# Altium footprint library ACT45B-510-2P-TL003.PcbLib: 1 footprints
Each footprint in its own frame and in the unit in brackets; x right, y up, seen from the top. Pads: shape width x height; smd on the part's side, far side on the other; paste and mask are expansions set on the pad; w line width, h text height; cw(c..) or ccw(c..) is an arc to the next point about the centre after c.
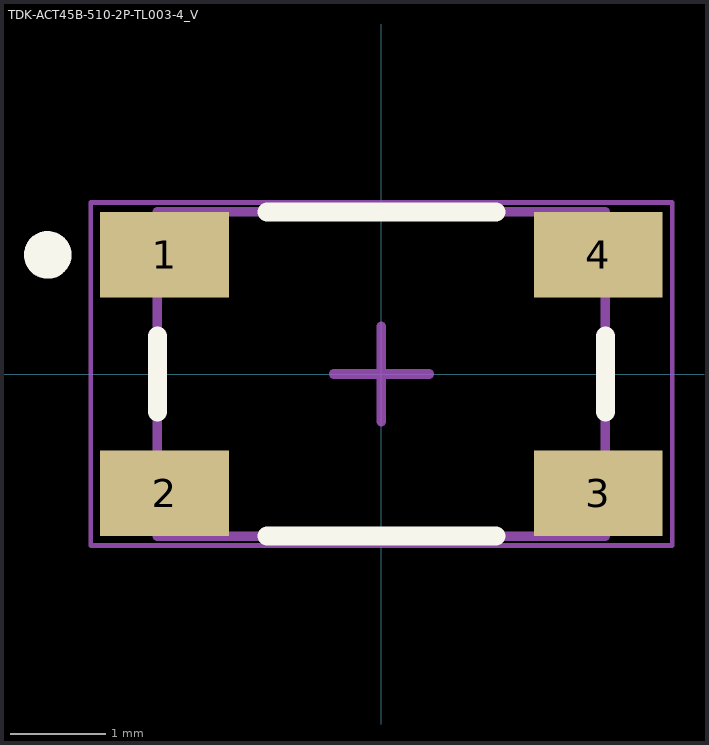
[diagram p0: the footprint, top view; thin cyan lines are the x and y axes]

## TDK-ACT45B-510-2P-TL003-4_V [mm] "SMD, 4-Leads, Body 4.7x3.4mm, Pitch 2.5mm"
height 3
pads (4):
  rect 1.35x0.9 smd: 1(-2.275,1.25) 2(-2.275,-1.25) 3(2.275,-1.25) 4(2.275,1.25)
Top Overlay:
  circle w0.25: c-3.5,1.25 r0.125
  lines w0.2: -2.35,-0.4 -2.35,0.4 ; -1.2,-1.7 1.2,-1.7 ; -1.2,1.7 1.2,1.7 ; 2.35,-0.4 2.35,0.4
Mechanical 13:
  lines w0.1: -2.35,-1.7 -2.35,1.7 2.35,1.7 2.35,-1.7 -2.35,-1.7
Mechanical 15:
  lines w0.05: -3.05,-1.8 3.05,-1.8 3.05,1.8 -3.05,1.8 -3.05,-1.8
  lines w0.1: -0.5,0 0.5,0 ; 0,-0.5 0,0.5
3D body: height 3, standoff 0, extent -2.35,-1.7 2.35,1.7